# Altium footprint library PcbLib1.PcbLib: 332 footprints (part 17 of 22)
Each footprint in its own frame and in the unit in brackets; x right, y up, seen from the top. Pads: shape width x height; smd on the part's side, far side on the other; paste and mask are expansions set on the pad; w line width, h text height; cw(c..) or ccw(c..) is an arc to the next point about the centre after c.
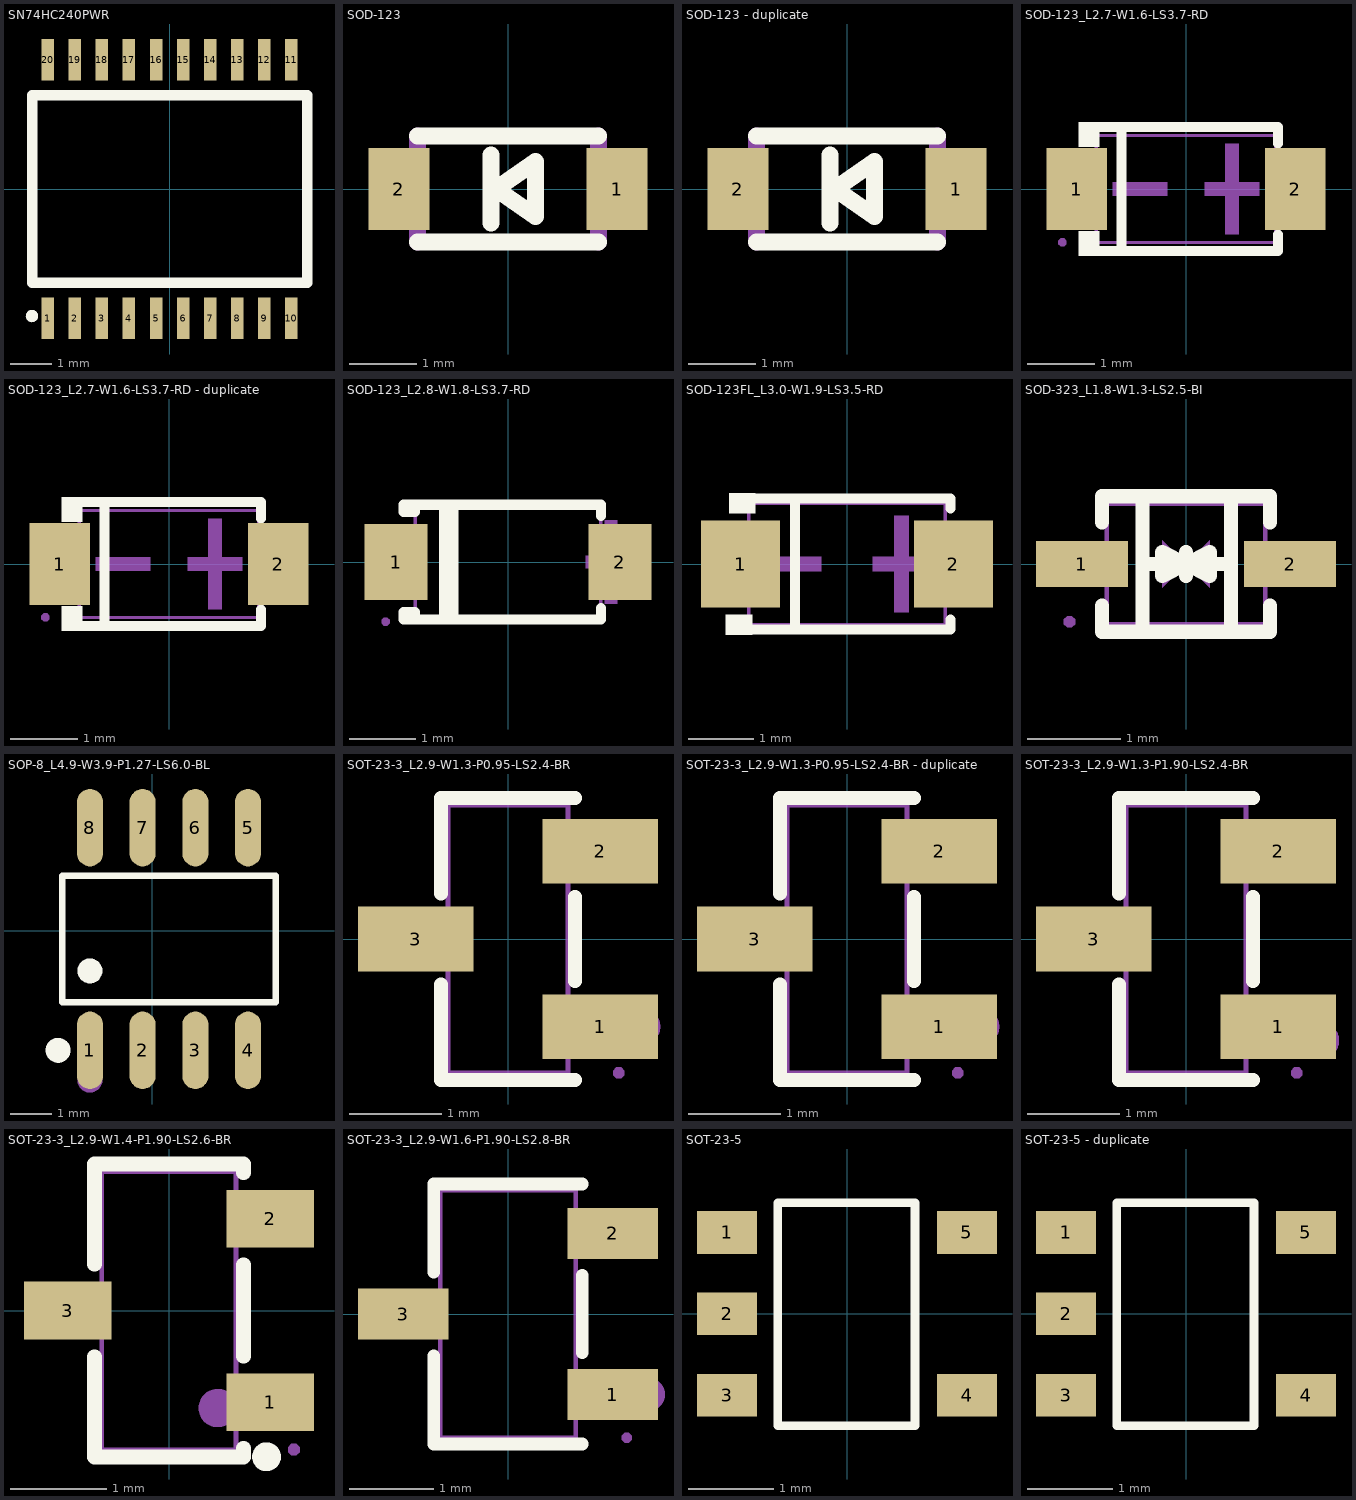
[diagram p16: the footprints below, top view; thin cyan lines are the x and y axes]

## SN74HC240PWR [mm]
pads (21):
  rect 0.3x1 smd: 1(-2.925,-3.1) 2(-2.275,-3.1) 3(-1.625,-3.1) 4(-0.975,-3.1) 5(-0.325,-3.1) 6(0.325,-3.1) 7(0.975,-3.1) 8(1.625,-3.1) 9(2.275,-3.1) 10(2.925,-3.1) 11(2.925,3.1) 12(2.275,3.1) 13(1.625,3.1) 14(0.975,3.1) 15(0.325,3.1) 16(-0.325,3.1) 17(-0.975,3.1) 18(-1.625,3.1) 19(-2.275,3.1) 20(-2.925,3.1)
  round 0.3 on Top Overlay: ""(-3.302,-3.048)
Top Overlay:
  lines w0.254: -3.3,-2.25 3.3,-2.25 3.3,2.25 -3.3,2.25 -3.3,-2.25

## SOD-123 [mil]
pads (2):
  rect 35.8x48 smd: 1(64,-0.01) 2(-64,-0.01)
Top Overlay:
  lines w10: -53,-31 53,-31 ; -53,31 53,31 ; -10,-20 -10,20 ; -7,0 16,-16 16,16 -7,0
Mechanical 15:
  lines w10: -53,-31 -53,31 ; 53,-31 53,31

## SOD-123 - duplicate [mil]
pads (2):
  rect 35.8x48 smd: 1(64,-0.01) 2(-64,-0.01)
Top Overlay:
  lines w10: -53,-31 53,-31 ; -53,31 53,31 ; -10,-20 -10,20 ; -7,0 16,16 16,-16 -7,0
Mechanical 15:
  lines w10: -53,-31 -53,31 ; 53,-31 53,31

## SOD-123_L2.7-W1.6-LS3.7-RD [mm]
pads (2):
  rect 0.91x1.22 smd paste+0 mask+0.051: 1(-1.635,0) 2(1.635,0)
Top Overlay:
  region: -1.3,-1.002 -1.3,-0.632 -1.605,-0.632 -1.605,-1.002
  region: -1.3,1.002 -1.3,0.632 -1.605,0.632 -1.605,1.002
  lines w0.152: -1.376,-0.926 1.376,-0.926 1.376,-0.683 ; -1.376,0.926 1.376,0.926 1.376,0.683 ; -0.967,-0.926 -0.967,0.926
Mechanical 6:
  region: 0.79,0.68 0.79,-0.68 0.586,-0.68 0.586,0.68
  region: 1.096,0.102 1.096,-0.102 0.28,-0.102 0.28,0.102
  region: -1.096,0.102 -1.096,-0.102 -0.28,-0.102 -0.28,0.102
Mechanical 15:
  region: -1.81,-0.3 -1.33,-0.3 -1.33,0.3 -1.81,0.3
  region: 1.81,0.3 1.33,0.3 1.33,-0.3 1.81,-0.3
  region: 1.595,0.3 1.845,0.3 1.845,-0.3 1.595,-0.3
  region: -1.845,0.3 -1.595,0.3 -1.595,-0.3 -1.845,-0.3
  region: -1.79,-0.8 -1.79,-0.775 -1.825,-0.74 -1.875,-0.74 -1.91,-0.775 -1.91,-0.8 -1.91,-0.825 -1.875,-0.86 -1.825,-0.86 -1.79,-0.825 -1.79,-0.8
  lines w0.051: -1.345,-0.8 1.345,-0.8 1.345,0.8 -1.345,0.8 -1.345,-0.8

## SOD-123_L2.7-W1.6-LS3.7-RD - duplicate [mm]
pads (2):
  rect 0.91x1.22 smd paste+0 mask+0.051: 1(-1.635,0) 2(1.635,0)
Top Overlay:
  region: -1.3,-1.002 -1.3,-0.632 -1.605,-0.632 -1.605,-1.002
  region: -1.3,1.002 -1.3,0.632 -1.605,0.632 -1.605,1.002
  lines w0.152: -1.376,-0.926 1.376,-0.926 1.376,-0.683 ; -1.376,0.926 1.376,0.926 1.376,0.683 ; -0.967,-0.926 -0.967,0.926
Mechanical 6:
  region: 0.79,0.68 0.79,-0.68 0.586,-0.68 0.586,0.68
  region: 1.096,0.102 1.096,-0.102 0.28,-0.102 0.28,0.102
  region: -1.096,0.102 -1.096,-0.102 -0.28,-0.102 -0.28,0.102
Mechanical 15:
  region: -1.81,-0.3 -1.33,-0.3 -1.33,0.3 -1.81,0.3
  region: 1.81,0.3 1.33,0.3 1.33,-0.3 1.81,-0.3
  region: 1.595,0.3 1.845,0.3 1.845,-0.3 1.595,-0.3
  region: -1.845,0.3 -1.595,0.3 -1.595,-0.3 -1.845,-0.3
  region: -1.79,-0.8 -1.79,-0.775 -1.825,-0.74 -1.875,-0.74 -1.91,-0.775 -1.91,-0.8 -1.91,-0.825 -1.875,-0.86 -1.825,-0.86 -1.79,-0.825 -1.79,-0.8
  lines w0.051: -1.345,-0.8 1.345,-0.8 1.345,0.8 -1.345,0.8 -1.345,-0.8

## SOD-123_L2.8-W1.8-LS3.7-RD [mm]
pads (2):
  rect 0.95x1.15 smd paste+0 mask+0.051: 1(-1.692,0) 2(1.692,0)
Top Overlay:
  lines w0.152: -0.97,-0.866 -0.97,0.866 ; -0.827,-0.866 -0.827,0.866 ; 1.406,-0.698 1.406,-0.866 -1.406,-0.866 ; 1.406,0.698 1.406,0.866 -1.406,0.866 ; -1.406,-0.866 -1.58,-0.866 -1.58,-0.755 -1.406,-0.755 -1.406,-0.866 ; -1.406,0.866 -1.58,0.866 -1.58,0.755 -1.406,0.755 -1.406,0.866
Mechanical 6:
  region: -2.03,0.095 -2.03,-0.095 -1.272,-0.095 -1.272,0.095
  region: 1.935,0.098 1.935,-0.092 1.177,-0.092 1.177,0.098
  region: 1.651,0.635 1.651,-0.629 1.461,-0.629 1.461,0.635
Mechanical 15:
  region: -1.79,-0.9 -1.79,-0.875 -1.826,-0.84 -1.875,-0.84 -1.91,-0.875 -1.91,-0.9 -1.91,-0.925 -1.875,-0.96 -1.826,-0.96 -1.79,-0.925 -1.79,-0.9
  region: -1.851,-0.465 -1.851,0.465 -1.301,0.465 -1.301,-0.465
  region: 1.851,-0.465 1.851,0.465 1.301,0.465 1.301,-0.465
  lines w0.051: -1.4,-0.9 -1.4,0.9 1.4,0.9 1.4,-0.9 -1.4,-0.9

## SOD-123FL_L3.0-W1.9-LS3.5-RD [mm]
pads (2):
  rect 1.208x1.33 smd paste+0 mask+0.051: 1(-1.624,0) 2(1.624,0)
Top Overlay:
  region: -1.848,-1.077 -1.448,-1.077 -1.448,-0.777 -1.848,-0.777
  region: -1.4,1.077 -1.8,1.077 -1.8,0.777 -1.4,0.777
  lines w0.152: -1.576,-1.001 1.576,-1.001 1.576,-0.845 ; -1.576,1.001 1.576,1.001 1.576,0.845 ; -0.791,-1.001 -0.791,1.001
Mechanical 6:
  region: 0.945,-0.74 0.945,0.74 0.723,0.74 0.723,-0.74
  region: -1.278,-0.111 -1.278,0.111 -0.39,0.111 -0.39,-0.111
  region: 1.278,-0.111 1.278,0.111 0.39,0.111 0.39,-0.111
Mechanical 15:
  region: -1.69,-0.925 -1.69,-0.9 -1.725,-0.865 -1.775,-0.865 -1.81,-0.9 -1.81,-0.925 -1.81,-0.95 -1.775,-0.985 -1.725,-0.985 -1.69,-0.95 -1.69,-0.925
  region: -1.75,-0.475 -1.12,-0.475 -1.12,0.475 -1.75,0.475
  region: 1.75,-0.475 1.12,-0.475 1.12,0.475 1.75,0.475
  lines w0.051: -1.5,-0.925 1.5,-0.925 1.5,0.925 -1.5,0.925 -1.5,-0.925

## SOD-323_L1.8-W1.3-LS2.5-BI [mm]
pads (2):
  rect 0.985x0.49 smd paste+0 mask+0.051: 1(-1.118,0) 2(1.118,0)
Top Overlay:
  lines w0.152: -0.901,-0.448 -0.901,-0.726 0.901,-0.726 0.901,-0.448 ; -0.901,0.448 -0.901,0.726 0.901,0.726 0.901,0.448 ; -0.467,-0.726 -0.467,0.726 ; 0.483,-0.726 0.483,0.726
  lines w0.154: -0.467,0 0.483,0.003 ; -0.127,0 0.003,0 0.254,0.127 0.254,-0.127 0.002,-0.003 ; -0.002,0.003 -0.254,0.127 -0.254,-0.127 -0.003,0 0.127,0 ; 0,-0.127 0,0.127
Mechanical 6:
  region: -0.254,0.254 -0.254,-0.254 0,0
  region: 0.254,-0.254 0.254,0.254 0,0
Mechanical 15:
  region: -1.19,-0.62 -1.19,-0.595 -1.225,-0.56 -1.275,-0.56 -1.31,-0.595 -1.31,-0.62 -1.31,-0.645 -1.275,-0.68 -1.225,-0.68 -1.19,-0.645 -1.19,-0.62
  region: 0.84,-0.163 0.84,0.163 0.96,0.163 0.96,-0.163
  region: 0.95,-0.163 0.95,0.163 1.25,0.163 1.25,-0.163
  region: -0.96,-0.163 -0.96,0.163 -0.84,0.163 -0.84,-0.163
  region: -1.25,-0.163 -1.25,0.163 -0.95,0.163 -0.95,-0.163
  lines w0.051: -0.85,-0.65 -0.85,0.65 0.85,0.65 0.85,-0.65 -0.85,-0.65

## SOP-8_L4.9-W3.9-P1.27-LS6.0-BL [mm]
pads (8):
  oval 0.63x1.865 smd: 1(-1.496,-2.878) 2(-0.226,-2.878) 3(1.044,-2.878) 4(2.314,-2.878) 5(2.314,2.487) 6(1.044,2.487) 7(-0.226,2.487) 8(-1.496,2.487)
Top Overlay:
  circle w0.3: c-1.496,-0.964 r0.15
  circle w0.3: c-2.263,-2.878 r0.15
  lines w0.152: -2.167,-1.716 -2.167,1.326 2.986,1.326 2.986,-1.716 -2.167,-1.716
Mechanical 15:
  circle w0.3: c-1.496,-3.595 r0.15

## SOT-23-3_L2.9-W1.3-P0.95-LS2.4-BR [mm]
pads (3):
  rect 1.25x0.7 smd mask+0.051: 1(1,-0.95) 2(1,0.95) 3(-1,0)
Top Overlay:
  lines w0.152: -0.726,-0.495 -0.726,-1.526 0.726,-1.526 ; -0.726,0.495 -0.726,1.526 0.726,1.526 ; 0.726,-0.455 0.726,0.455
Mechanical 6:
  circle w0.2: c1.45,-0.95 r0.1
Mechanical 15:
  region: -1.2,-0.2 -1.2,0.2 -0.8,0.2 -0.8,-0.2
  region: -0.81,-0.2 -0.81,0.2 -0.64,0.2 -0.64,-0.2
  region: 0.8,0.75 0.8,1.15 1.2,1.15 1.2,0.75
  region: 0.64,0.75 0.64,1.15 0.81,1.15 0.81,0.75
  region: 0.8,-1.15 0.8,-0.75 1.2,-0.75 1.2,-1.15
  region: 0.64,-1.15 0.64,-0.75 0.81,-0.75 0.81,-1.15
  region: 1.26,-1.45 1.26,-1.425 1.225,-1.39 1.175,-1.39 1.14,-1.425 1.14,-1.45 1.14,-1.475 1.175,-1.51 1.225,-1.51 1.26,-1.475 1.26,-1.45
  lines w0.051: -0.65,-1.45 0.65,-1.45 0.65,1.45 -0.65,1.45 -0.65,-1.45

## SOT-23-3_L2.9-W1.3-P0.95-LS2.4-BR - duplicate [mm]
pads (3):
  rect 1.25x0.7 smd mask+0.051: 1(1,-0.95) 2(1,0.95) 3(-1,0)
Top Overlay:
  lines w0.152: -0.726,-0.495 -0.726,-1.526 0.726,-1.526 ; -0.726,0.495 -0.726,1.526 0.726,1.526 ; 0.726,-0.455 0.726,0.455
Mechanical 6:
  circle w0.2: c1.45,-0.95 r0.1
Mechanical 15:
  region: -1.2,-0.2 -1.2,0.2 -0.8,0.2 -0.8,-0.2
  region: -0.81,-0.2 -0.81,0.2 -0.64,0.2 -0.64,-0.2
  region: 0.8,0.75 0.8,1.15 1.2,1.15 1.2,0.75
  region: 0.64,0.75 0.64,1.15 0.81,1.15 0.81,0.75
  region: 0.8,-1.15 0.8,-0.75 1.2,-0.75 1.2,-1.15
  region: 0.64,-1.15 0.64,-0.75 0.81,-0.75 0.81,-1.15
  region: 1.26,-1.45 1.26,-1.425 1.225,-1.39 1.175,-1.39 1.14,-1.425 1.14,-1.45 1.14,-1.475 1.175,-1.51 1.225,-1.51 1.26,-1.475 1.26,-1.45
  lines w0.051: -0.65,-1.45 0.65,-1.45 0.65,1.45 -0.65,1.45 -0.65,-1.45

## SOT-23-3_L2.9-W1.3-P1.90-LS2.4-BR [mm]
pads (3):
  rect 1.25x0.7 smd paste+0 mask+0.051: 1(1,-0.95) 2(1,0.95) 3(-1,0)
Top Overlay:
  lines w0.152: -0.726,-0.495 -0.726,-1.526 0.726,-1.526 ; -0.726,0.495 -0.726,1.526 0.726,1.526 ; 0.726,-0.455 0.726,0.455
Mechanical 6:
  circle w0.2: c1.46,-1.1 r0.1
Mechanical 15:
  region: -1.2,-0.215 -1.2,0.215 -0.9,0.215 -0.9,-0.215
  region: -0.91,-0.215 -0.91,0.215 -0.64,0.215 -0.64,-0.215
  region: 0.9,-1.165 0.9,-0.735 1.2,-0.735 1.2,-1.165
  region: 0.64,-1.165 0.64,-0.735 0.91,-0.735 0.91,-1.165
  region: 0.9,0.735 0.9,1.165 1.2,1.165 1.2,0.735
  region: 0.64,0.735 0.64,1.165 0.91,1.165 0.91,0.735
  region: 1.26,-1.45 1.26,-1.425 1.225,-1.39 1.175,-1.39 1.14,-1.425 1.14,-1.45 1.14,-1.475 1.175,-1.51 1.225,-1.51 1.26,-1.475 1.26,-1.45
  lines w0.051: -0.65,-1.45 0.65,-1.45 0.65,1.45 -0.65,1.45 -0.65,-1.45

## SOT-23-3_L2.9-W1.4-P1.90-LS2.6-BR [mm]
pads (3):
  rect 0.91x0.6 smd paste+0 mask+0.051: 1(1.055,-0.955) 2(1.055,0.955) 3(-1.055,0)
Top Overlay:
  circle w0.15: c1.016,-1.524 r0.075
  lines w0.152: -0.776,-0.48 -0.776,-1.526 0.776,-1.526 0.776,-1.435 ; -0.776,0.48 -0.776,1.526 0.776,1.526 0.776,1.435 ; 0.776,-0.475 0.776,0.475
Mechanical 6:
  circle w0.2: c0.508,-1.016 r0.1
Mechanical 15:
  region: 1.36,-1.45 1.36,-1.425 1.325,-1.39 1.275,-1.39 1.24,-1.425 1.24,-1.45 1.24,-1.475 1.275,-1.51 1.325,-1.51 1.36,-1.475 1.36,-1.45
  region: 1.3,-0.73 0.95,-0.73 0.95,-1.18 1.3,-1.18
  region: 0.96,-0.73 0.69,-0.73 0.69,-1.18 0.96,-1.18
  region: 1.3,1.18 0.95,1.18 0.95,0.73 1.3,0.73
  region: 0.96,1.18 0.69,1.18 0.69,0.73 0.96,0.73
  region: -1.3,0.225 -0.95,0.225 -0.95,-0.225 -1.3,-0.225
  region: -0.96,0.225 -0.69,0.225 -0.69,-0.225 -0.96,-0.225
  lines w0.051: -0.7,-1.45 -0.7,1.45 0.7,1.45 0.7,-1.45 -0.7,-1.45

## SOT-23-3_L2.9-W1.6-P1.90-LS2.8-BR [mm]
pads (3):
  rect 1.07x0.6 smd mask+0.051: 1(1.235,-0.95) 2(1.235,0.95) 3(-1.235,0)
Top Overlay:
  lines w0.152: -0.876,-0.495 -0.876,-1.536 0.876,-1.536 ; -0.876,0.495 -0.876,1.536 0.876,1.536 ; 0.876,-0.455 0.876,0.455
Mechanical 6:
  circle w0.2: c1.651,-0.95 r0.1
Mechanical 15:
  region: 1.46,-1.46 1.46,-1.435 1.425,-1.4 1.375,-1.4 1.34,-1.435 1.34,-1.46 1.34,-1.485 1.375,-1.52 1.425,-1.52 1.46,-1.485 1.46,-1.46
  region: 0.95,-1.15 0.95,-0.75 1.4,-0.75 1.4,-1.15
  region: 0.79,-1.15 0.79,-0.75 0.96,-0.75 0.96,-1.15
  region: 0.95,0.75 0.95,1.15 1.4,1.15 1.4,0.75
  region: 0.79,0.75 0.79,1.15 0.96,1.15 0.96,0.75
  region: -0.95,-0.2 -0.95,0.2 -1.4,0.2 -1.4,-0.2
  region: -0.96,-0.2 -0.96,0.2 -0.79,0.2 -0.79,-0.2
  lines w0.051: -0.8,-1.46 -0.8,1.46 0.8,1.46 0.8,-1.46 -0.8,-1.46

## SOT-23-5 [mm]
height 4.5
pads (5):
  rect 0.7x0.5 smd: 1(-1.4,0.95) 2(-1.4,0) 3(-1.4,-0.95) 4(1.4,-0.95) 5(1.4,0.95)
Top Overlay:
  lines w0.1: -0.807,-1.305 0.793,-1.305 0.793,1.295 -0.807,1.295 -0.807,-1.305

## SOT-23-5 - duplicate [mm]
height 4.5
pads (5):
  rect 0.7x0.5 smd: 1(-1.4,0.95) 2(-1.4,0) 3(-1.4,-0.95) 4(1.4,-0.95) 5(1.4,0.95)
Top Overlay:
  lines w0.1: -0.807,-1.305 -0.807,1.295 0.793,1.295 0.793,-1.305 -0.807,-1.305